# Altium schematic symbol library RC0603FR-07562RL.SchLib: 1 symbol
Pins are listed as number, name and electrical type; pins without a type are passive.

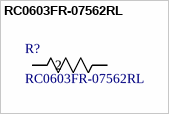
[diagram p0: symbol RC0603FR-07562RL]

## RC0603FR-07562RL
designator R?
No Description Available; Manufacturer_Name: Yageo; Copyright: Copyright (C) 2026 Ultra Librarian. All rights reserved.; Manufacturer_Part_Number: RC0603FR-07562RL
footprint RC0603N_YAG
pins: 1, 2